# Altium footprint library ESP32C3N.PcbLib: 12 footprints
Each footprint in its own frame and in the unit in brackets; x right, y up, seen from the top. Pads: shape width x height; smd on the part's side, far side on the other; paste and mask are expansions set on the pad; w line width, h text height; cw(c..) or ccw(c..) is an arc to the next point about the centre after c.
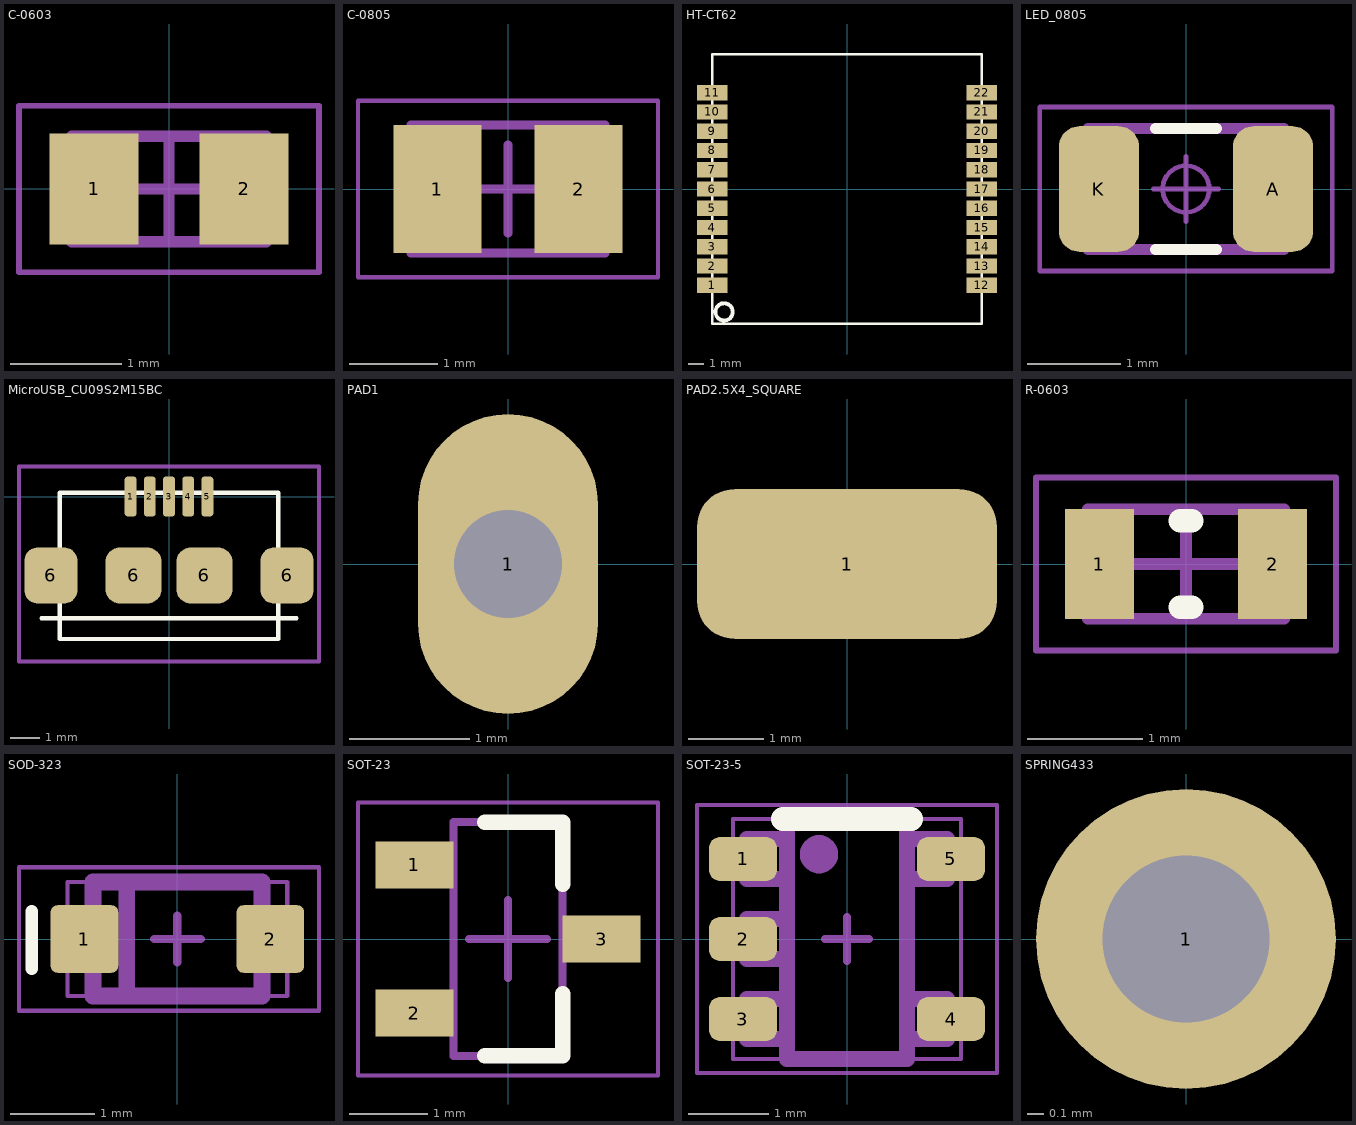
[diagram p0: the footprints below, top view; thin cyan lines are the x and y axes]

## C-0603 [mm] "Chip Capacitor, 2-Leads, Body 1,60x0,80mm, IPC Medium Density"
height 0.85
pads (2):
  rect 0.8x1 smd: 1(-0.675,0) 2(0.675,0)
Mechanical 13:
  lines w0.1: -0.875,-0.475 0.875,-0.475 0.875,0.475 -0.875,0.475 -0.875,-0.475
Mechanical 15:
  lines w0.05: -1.35,-0.75 -1.35,0.75 1.35,0.75 1.35,-0.75 -1.35,-0.75
  lines w0.1: -0.475,0 0.475,0 ; 0,-0.475 0,0.475
3D body "C_0603_1608Metric.step": height 0.8, standoff 0, extent -0.8,-0.4 0.8,0.4

## C-0805 [mm] "Chip Capacitor, 2-Leads, Body 2,00x1,25mm, IPC Medium Density"
height 1.1
pads (2):
  rect 1x1.45 smd: 1(-0.8,0) 2(0.8,0)
Mechanical 13:
  lines w0.1: -1.1,-0.725 -1.1,0.725 1.1,0.725 1.1,-0.725 -1.1,-0.725
Mechanical 15:
  lines w0.05: -1.7,-1 -1.7,1 1.7,1 1.7,-1 -1.7,-1
  lines w0.1: -0.5,0 0.5,0 ; 0,-0.5 0,0.5
3D body "C_0805_2012Metric.step": height 1.25, standoff 0, extent -1,-0.625 1,0.625

## HT-CT62 [mm]
height 2.6
pads (22):
  rect 2x1 smd: 1(-8.89,-6.35) 2(-8.89,-5.08) 3(-8.89,-3.81) 4(-8.89,-2.54) 5(-8.89,-1.27) 6(-8.89,0) 7(-8.89,1.27) 8(-8.89,2.54) 9(-8.89,3.81) 10(-8.89,5.08) 11(-8.89,6.35) 12(8.89,-6.35) 13(8.89,-5.08) 14(8.89,-3.81) 15(8.89,-2.54) 16(8.89,-1.27) 17(8.89,0) 18(8.89,1.27) 19(8.89,2.54) 20(8.89,3.81) 21(8.89,5.08) 22(8.89,6.35)
Top Overlay:
  circle w0.254: c-8.103,-8.103 r0.568
  lines w0.152: -8.89,-8.89 -8.89,8.89 8.89,8.89 8.89,-8.89 -8.89,-8.89
3D body "heltec ht62.step": height 2.8, standoff 0, extent -8.89,-8.89 8.89,8.89

## LED_0805 [mm] "LED, Chip; 2.00 mm L X 1.25 mm W X 0.80 mm H body"
height 0.8
pads (2):
  rrect51% 0.86x1.35 smd: A(0.935,0) K(-0.935,0)
Top Overlay:
  lines w0.12: -0.325,-0.65 0.325,-0.65 ; -0.325,0.65 0.325,0.65
Mechanical 11:
  lines w0.12: -1.05,-0.65 1.05,-0.65 1.05,0.65 -1.05,0.65 -1.05,-0.65
Mechanical 12:
  lines w0.025: -1,-0.625 1,-0.625 ; -1,-0.625 -1,0.625 ; -1,-0.625 -1,0.625 ; -1,-0.625 -0.6,-0.625 -0.6,0.625 -1,0.625 ; -1,0.625 1,0.625 ; 1,-0.625 1,0.625 ; 1,-0.625 0.6,-0.625 0.6,0.625 1,0.625 ; 1,-0.625 1,0.625
Mechanical 15:
  circle w0.05: c0,0 r0.25
  lines w0.05: -0.35,0 0.35,0 ; 0,-0.35 0,0.35 ; -1.57,-0.88 1.57,-0.88 1.57,0.88 -1.57,0.88 -1.57,-0.88
3D body: height 0.25, standoff 0, extent -1,-0.625 1,0.625

## MicroUSB_CU09S2M15BC [mm]
height 2.35
pads (9):
  rrect50% 0.4x1.35 smd mask+0.075: 1(-1.3,0) 2(-0.65,0) 3(0,0) 4(0.65,0) 5(1.3,0)
  rrect50% 1.8x1.9 smd: 6(-4,-2.675) 6(4,-2.675)
  rrect50% 1.9x1.9 smd: 6(-1.2,-2.675) 6(1.2,-2.675)
Top Overlay:
  lines w0.15: -4.318,-4.125 4.318,-4.125 ; -3.7,-4.825 3.7,-4.825 3.7,0.127 -3.7,0.127 -3.7,-4.825
Mechanical 15:
  lines w0.15: -5.08,-5.588 -5.08,-2.54 -5.08,0.762 -5.08,1.016 5.08,1.016 5.08,-5.588 -5.08,-5.588
3D body "USB_Micro-B_Molex_47346-0001.step": height 2.7, standoff -0.24, extent -3.989,-5.04 3.989,0.378

## PAD1 [mm]
height 2.6
pads (1):
  oval 1.5x2.5 hole 0.9: 1(0,0)

## PAD2.5X4_SQUARE [mm]
pads (1):
  rrect50% 4x2 smd: 1(0,0)

## R-0603 [mm] "Chip Resistor, 2-Leads, Body 1,60x0,82mm, IPC Medium Density"
height 0.6
pads (2):
  rect 0.6x0.95 smd: 1(-0.75,0) 2(0.75,0)
Top Overlay:
  lines w0.2: -0.05,-0.375 0.05,-0.375 ; -0.05,0.375 0.05,0.375
Mechanical 13:
  lines w0.1: -0.85,-0.475 0.85,-0.475 0.85,0.475 -0.85,0.475 -0.85,-0.475
Mechanical 15:
  lines w0.05: -1.3,-0.75 1.3,-0.75 1.3,0.75 -1.3,0.75 -1.3,-0.75
  lines w0.1: -0.475,0 0.475,0 ; 0,-0.475 0,0.475
3D body "R_0603_1608Metric.step": height 0.45, standoff 0, extent -0.8,-0.4 0.8,0.4

## SOD-323 [mm]
pads (2):
  rrect20% 0.8x0.8 smd mask+0.07: 1(-1.1,0) 2(1.1,0)
Top Overlay:
  lines w0.15: -1.725,-0.35 -1.725,0.325
Top Component Center:
  lines w0.1: -0.275,0 0.275,0 ; 0,-0.275 0,0.275
Top Component Outline:
  lines w0.05: -1.3,-0.675 -1.3,0.675 1.3,0.675 1.3,-0.675 -1.3,-0.675
Top Assembly:
  lines w0.2: -1,-0.3 -1.3,-0.3 -1.3,0.3 -1,0.3 ; -0.6,-0.675 -0.6,0.675 ; 1,-0.3 1.3,-0.3 1.3,0.3 1,0.3 ; -1,-0.675 -1,0.675 1,0.675 1,-0.675 -1,-0.675
Top Courtyard:
  lines w0.05: -1.875,-0.85 1.675,-0.85 1.675,0.85 -1.875,0.85 -1.875,-0.85
Top Designator:
  text ".Designator" at -2.435,-0.25 h1.3
Top Value:
  text ".Comment" at -2.213,-0.335 h1.3
3D body "User Library-SOD323-1.step": height 1.1, standoff 0, extent -1.3,-0.675 1.3,0.675

## SOT-23 [mm]
height 2.6
pads (3):
  rect 1x0.6 smd: 1(-1.2,0.95) 2(-1.2,-0.95) 3(1.2,0)
Top Overlay:
  lines w0.2: -0.3,-1.5 0.7,-1.5 0.7,-0.7 ; -0.3,1.5 0.7,1.5 0.7,0.7
Mechanical 13:
  lines w0.1: -0.7,-1.5 0.7,-1.5 0.7,1.5 -0.7,1.5 -0.7,-1.5
Mechanical 15:
  lines w0.05: -1.925,-1.75 1.925,-1.75 1.925,1.75 -1.925,1.75 -1.925,-1.75
  lines w0.1: -0.5,0 0.5,0 ; 0,-0.5 0,0.5
3D body "SOT-23.step": height 1.2, standoff 0, extent -1.25,-1.5 1.25,1.5

## SOT-23-5 [mm]
height 2.6
pads (5):
  rrect50% 0.85x0.55 smd mask+0.06: 1(-1.3,1) 2(-1.3,0) 3(-1.3,-1) 4(1.3,-1) 5(1.3,1)
Top Overlay:
  lines w0.3: -0.8,1.5 0.8,1.5
Top Component Center:
  lines w0.1: -0.275,0 0.275,0 ; 0,-0.275 0,0.275
Top Component Outline:
  lines w0.05: -1.425,-1.5 1.425,-1.5 1.425,1.5 -1.425,1.5 -1.425,-1.5
Top Assembly:
  lines w0.2: -0.75,-1.25 -1.25,-1.25 -1.25,-0.75 -0.75,-0.75 ; -0.75,-0.25 -1.25,-0.25 -1.25,0.25 -0.75,0.25 ; -0.75,0.75 -1.25,0.75 -1.25,1.25 -0.75,1.25 ; 0.75,-1.25 1.25,-1.25 1.25,-0.75 0.75,-0.75 ; 0.75,0.75 1.25,0.75 1.25,1.25 0.75,1.25 ; -0.75,-1.5 -0.75,1.5 0.75,1.5 0.75,-1.5 -0.75,-1.5
  lines w0.254: -0.364,1.171 ccw(c-0.35,1.06) -0.336,1.171
Top Courtyard:
  lines w0.05: -1.875,-1.675 1.875,-1.675 1.875,1.675 -1.875,1.675 -1.875,-1.675
Top Designator:
  text ".Designator" at 0.25,-2.435 h1.3
Top Value:
  text ".Comment" at 0.335,-2.213 h1.3
3D body "User Library-SOT23-5-2.step": height 1.45, standoff 0, extent -1.4,-1.45 1.4,1.45

## SPRING433 [mm]
height 2.6
pads (1):
  round 1.8 hole 1: 1(0,0)
3D body "User Library-433MHz Antenna Bended.step": height 6.52, standoff -0.73, extent -3.598,-0.399 3.524,51.8